# EAGLE library part 6130XX21021_61301821021 (library WR-PHD)
WR-PHD 2.54 mm THT Angled Dual Pin Header ARTICLE PROPERTIES: Pins:4;​ 6;​ 8;​ 10;​ 12;​ 14;​ 16;​ 18;​ 20;​ 22;​ 24;​ 26;​ 32;​ 34;​ 36;​ 40;​ 64;​ 72 KIND PROPERTIES: Pitch：2.54 mm Quality Class:3 as per CECC 75 301-802 Rows：Dual Gender：Pin Header Type：Angled;​ Board Stacker MATERIAL PROPERTIES: Insulator Material :PA6T Insulator Flammability Rating:UL94 V-0 Contact Material:Copper Alloy Contact Plating:Gold Contact Type:Stamped GENERAL INFORMATION Operating Temperature:-40 up to +105 °C Compliance:RoHS ELECTRICAL PROPERTIES: Rated Current:3 A IR 1:3 A Withstanding Voltage:500 V (AC) Contact Resistance:20 mΩ RISO:1000 MΩ CERTIFICATION UL Approval:E323964 PACKAGING PROPERTIES Packaging:Bag <https://katalog.we-online.com/media/images/v2/o33214v209%20Family_wr-phd_6130XX21021.jpg> Details see: https://katalog.we-online.com/en/em/PHD_2_54_THT_ANGLED_DUAL_PIN_HEADER_6130XX21021 Updated by Yingchun,Shan 2019-10-16 2019 (C) Würth Elektronik
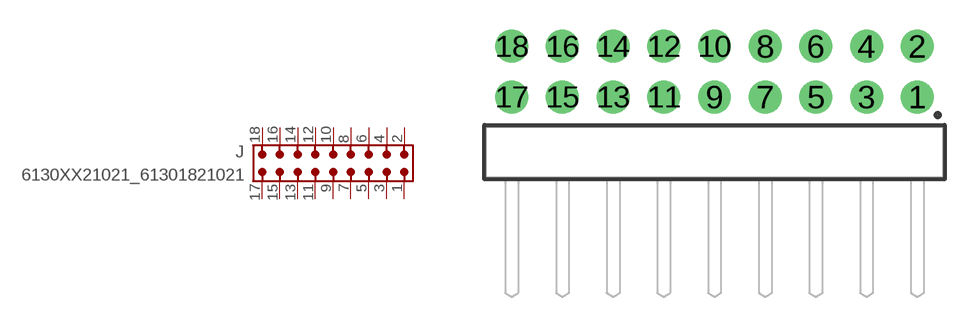
[diagram p95: symbol with the pads of 61301821021; footprint 61301821021]

Designator prefix J

## 6130XX21021_61301821021 (DATASHEET-URL: https://www.we-online.com/redexpert/spec/61301821021?ae; GENDER: Pin Header; IR: 3A; MOUNT: THT; PACKAGING: Bag; PART-NUMBER: 61301821021; PINS: 18; PITCH: 2.54 mm; ROWS: Dual; TYPE: Angled; VALUE: 61301821021)  [61301821021]
1  1  pas
2  2  pas
3  3  pas
4  4  pas
5  5  pas
6  6  pas
7  7  pas
8  8  pas
9  9  pas
10  10  pas
11  11  pas
12  12  pas
13  13  pas
14  14  pas
15  15  pas
16  16  pas
17  17  pas
18  18  pas

## Footprint 61301821021 (pad centres in mm)
WR-PHD 2.54 mm THT Angled Dual Pin Header, 18 Pins
drill 1.1: 1 10.16,2.77; 2 10.16,5.31; 3 7.62,2.77; 4 7.62,5.31; 5 5.08,2.77; 6 5.08,5.31; 7 2.54,2.77; 8 2.54,5.31; 9 0,2.77; 10 0,5.31; 11 -2.54,2.77; 12 -2.54,5.31; 13 -5.08,2.77; 14 -5.08,5.31; 15 -7.62,2.77; 16 -7.62,5.31; 17 -10.16,2.77; 18 -10.16,5.31